# Altium footprint library NFC.PcbLib: 31 footprints (part 1 of 2)
Each footprint in its own frame and in the unit in brackets; x right, y up, seen from the top. Pads: shape width x height; smd on the part's side, far side on the other; paste and mask are expansions set on the pad; w line width, h text height; cw(c..) or ccw(c..) is an arc to the next point about the centre after c.
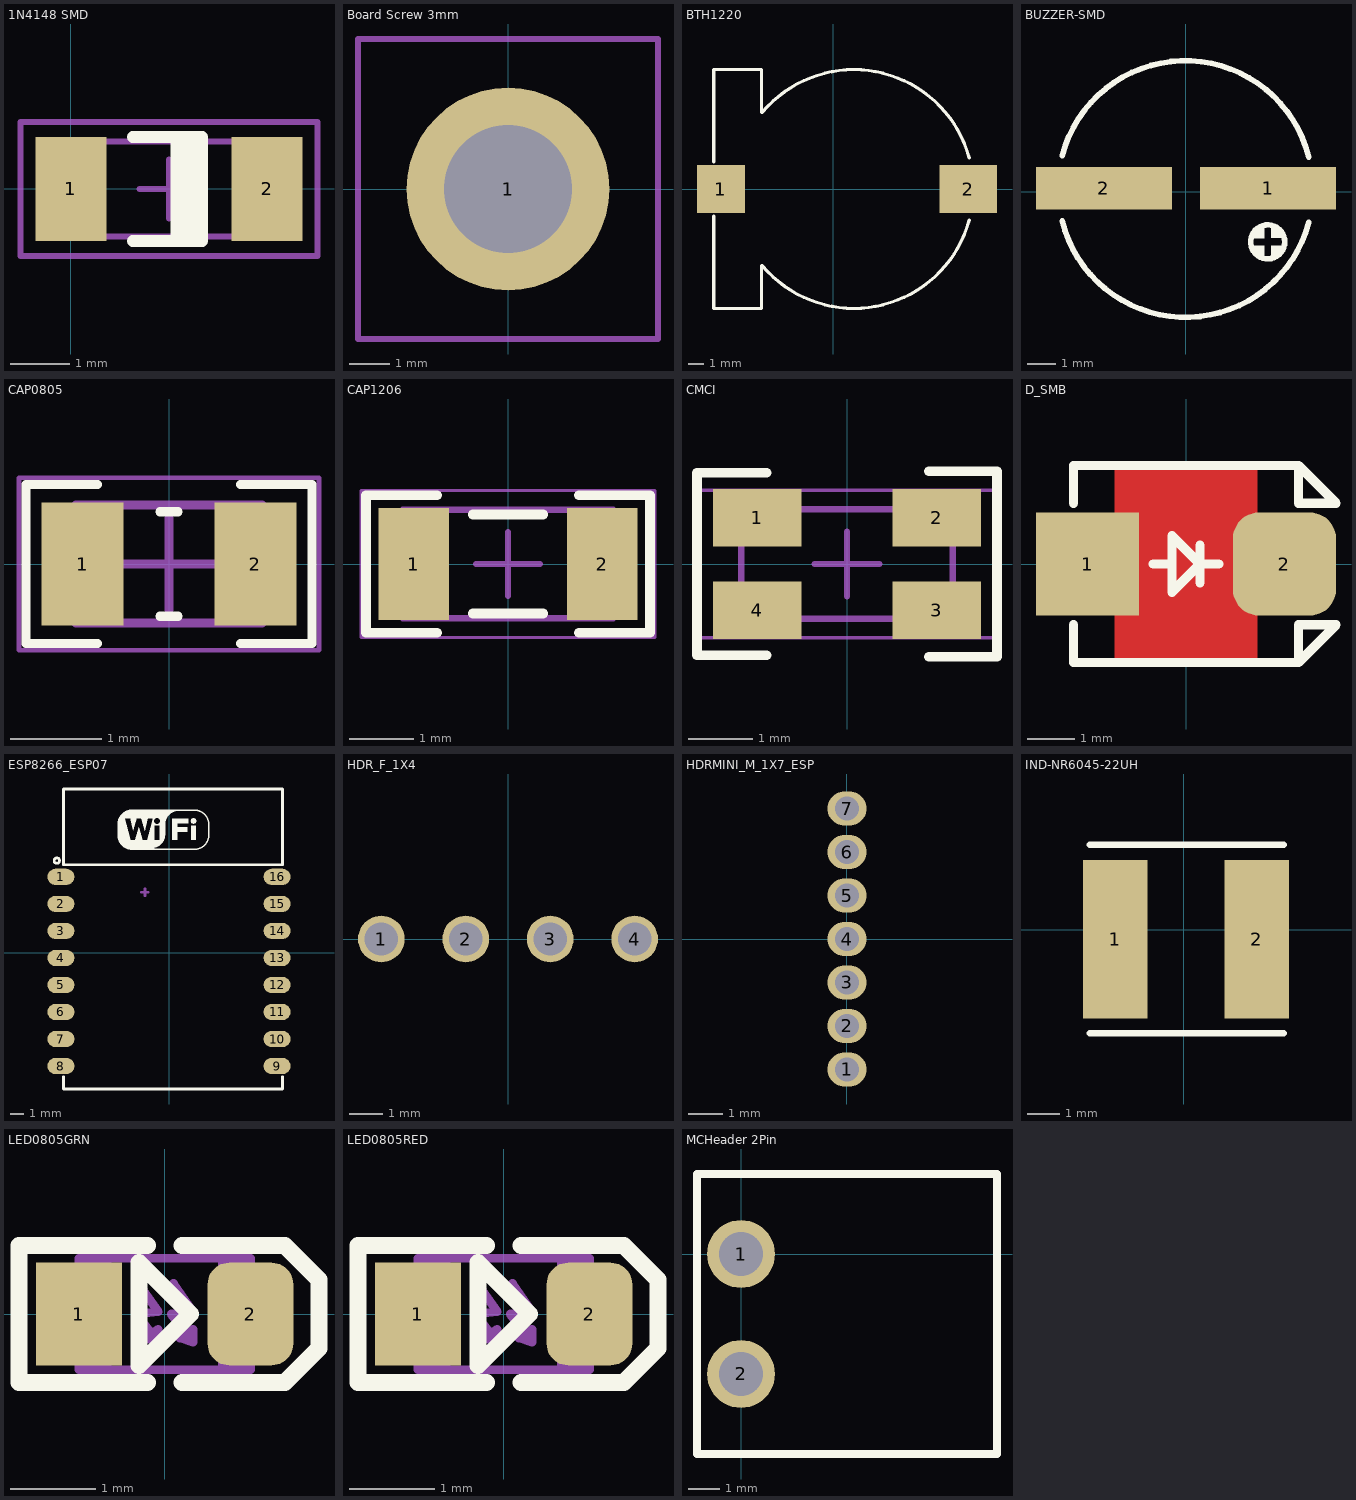
[diagram p0: the footprints below, top view; thin cyan lines are the x and y axes]

## 1N4148 SMD [mm] "Mini MELF SOD-80"
pads (2):
  rect 1.2x1.75 smd: 1(0,0) 2(3.3,0)
Top Overlay:
  region: 2.223,0.875 1.673,0.875 1.673,-0.875 2.223,-0.875
  lines w0.2: 1.04,-0.875 2.209,-0.875 2.209,0.875 1.04,0.875
Mechanical 13:
  rectangle: -0.2,-0.8 0.298,0.8
  lines w0.1: -0.2,-0.8 -0.2,0.8 3.5,0.8 3.5,-0.8 -0.2,-0.8
Mechanical 15:
  lines w0.1: 1.15,0 2.15,0 ; 1.65,-0.5 1.65,0.5 ; -0.85,-1.125 -0.85,1.125 4.15,1.125 4.15,-1.125 -0.85,-1.125
3D body "User Library-Diode MELF.STEP": height 1.55, standoff 0.05, extent -0.125,-0.748 3.375,0.75

## Board Screw 3mm [mm]
pads (1):
  round 5 hole 3.15 mask-0.025: 1(0,0)
Bottom Overlay:
  circle w0.1: c0,0 r2.718
Mechanical 15:
  lines w0.15: -3.7,-3.7 3.7,-3.7 3.7,3.7 -3.7,3.7 -3.7,-3.7
3D body "User Library-User Library-4-40 x _125 sems.STEP": height 2.34, standoff -3, extent -2.656,-2.692 2.681,2.667

## BTH1220 [mm] "COIN CELL BATTERY HOLDER 1220 12mm"
height 2
pads (2):
  rect 3x3 smd: 1(-7.055,0)
  rect 3.6x3 smd: 2(8.489,0)
Top Overlay:
  lines w0.2: -7.5,-1.7 -7.5,-7.5 -4.5,-7.5 -4.5,-4.821 ; -7.5,1.7 -7.5,7.5 -4.5,7.5 -4.5,4.821 ; -4.445,-4.821 ccw(c1.3,0) 8.544,-1.941 ; -4.445,4.821 cw(c1.3,0) 8.544,1.941
3D body "SMD Battery Holder.step": height 4.26, standoff -0.49, extent -8.5,-7.4 10.3,7.349

## BUZZER-SMD [mm]
height 2
pads (2):
  rect 4.8x1.5 smd: 1(2.913,0.134) 2(-2.887,0.134)
Top Overlay:
  circle w0.2: c2.9,-1.766 r0.6
  region: 3.398,-1.893 3.01,-1.893 3.01,-2.266 3.398,-2.266
  region: 3.4,-1.265 3.012,-1.265 3.012,-1.638 3.4,-1.638
  rectangle: 2.402,-1.639 2.79,-1.266
  rectangle: 2.402,-2.266 2.79,-1.893
  lines w0.2: -4.363,-1.032 ccw(c0,0.07) 4.351,-1.078 ; -4.363,1.281 cw(c-0.012,0.134) 4.351,1.235
3D body "FUET-1030-3V.step": height 3.2, standoff 0, extent -5.5,-4.873 5.5,5.127

## CAP0805 [mm] "Chip Capacitor, 2-Leads, Body 2/00x1/25mm, IPC Medium Density DESIGNER:ABBAS BASEREH"
height 0.5
pads (2):
  rect 0.9x1.35 smd: 1(-0.95,0) 2(0.95,0)
Top Overlay:
  lines w0.1: -0.788,-0.875 -1.575,-0.875 -1.575,0.875 -0.788,0.875 ; -0.1,-0.575 0.1,-0.575 ; -0.1,0.575 0.1,0.575 ; 0.788,-0.875 1.575,-0.875 1.575,0.875 0.788,0.875
Mechanical 13:
  lines w0.1: -1.025,-0.65 1.025,-0.65 1.025,0.65 -1.025,0.65 -1.025,-0.65
Mechanical 15:
  lines w0.05: -1.65,-0.95 1.65,-0.95 1.65,0.95 -1.65,0.95 -1.65,-0.95
  lines w0.1: -0.5,0 0.5,0 ; 0,-0.5 0,0.5
3D body "CAP0805.step": height 0.5, standoff 0, extent -1.025,-0.65 1.025,0.65

## CAP1206 [mm] "Chip Capacitor, 2-Leads, Body 3/20x1/60mm, IPC Medium Density DESIGNER:ABBAS BASEREH"
height 0.94
pads (2):
  rect 1.1x1.75 smd: 1(-1.475,0) 2(1.475,0)
Top Overlay:
  lines w0.15: -1.112,-1.075 -2.225,-1.075 -2.225,1.075 -1.112,1.075 ; -0.55,-0.775 0.55,-0.775 ; -0.55,0.775 0.55,0.775 ; 1.112,-1.075 2.225,-1.075 2.225,1.075 1.112,1.075
Mechanical 13:
  lines w0.1: -1.65,-0.85 -1.65,0.85 1.65,0.85 1.65,-0.85 -1.65,-0.85
Mechanical 15:
  lines w0.05: -2.3,-1.15 -2.3,1.15 2.3,1.15 2.3,-1.15 -2.3,-1.15
  lines w0.1: -0.5,0 0.5,0 ; 0,-0.5 0,0.5
3D body "CAP1206.step": height 0.94, standoff 0, extent -1.65,-0.85 1.65,0.85

## CD54-10UH SMD [mm]
3D body "SMD_Inductor_CD54.step": height 4.49, standoff -0.01, extent -3.129,-2.549 2.671,2.651

## CMCI [mm]
pads (4):
  rect 1.38x0.9 smd: 1(-1.4,0.72) 2(1.4,0.72) 3(1.4,-0.72) 4(-1.4,-0.72)
Top Overlay:
  lines w0.15: -1.252,-1.422 -2.337,-1.422 -2.337,1.422 -1.252,1.422 ; 1.278,-1.448 2.337,-1.448 2.337,1.448 1.278,1.448
Mechanical 13:
  lines w0.1: -1.65,-0.85 -1.65,0.85 1.65,0.85 1.65,-0.85 -1.65,-0.85
Mechanical 15:
  lines w0.05: -2.3,-1.15 -2.3,1.15 2.3,1.15 2.3,-1.15 -2.3,-1.15
  lines w0.1: -0.5,0 0.5,0 ; 0,-0.5 0,0.5
3D body "IND_DLW31S_1206_MUR.step": height 2.1, standoff 0, extent -1.7,-0.9 1.7,0.9

## D_SMB [mm] "SMB Molded Diode, 2-Leads, Body 4.3x3.5mm"
pads (2):
  rect 2.2x2.2 smd paste-0.1: 1(-2.1,0)
  rrect50% 2.2x2.2 smd paste-0.1: 2(2.1,0)
Top Layer:
  pour cut-out: -1.524,2.1 -1.524,-2.1 1.524,-2.1 1.524,2.1
Top Overlay:
  lines w0.2: -2.4,-1.3 -2.4,-2.1 2.4,-2.1 ; -2.4,1.3 -2.4,2.1 2.4,2.1 ; -0.7,0 -0.3,0 ; 0.3,-0.4 0.3,0.4 ; 0.7,0 0.3,0 ; 0.3,0 -0.3,-0.6 -0.3,0.6 0.3,0 ; 2.4,-2.1 3.2,-1.3 2.4,-1.3 2.4,-2.1 ; 2.4,2.1 2.4,1.3 3.2,1.3 2.4,2.1
3D body "User Library-DIOM5539X24.step": height 2.45, standoff 0.03, extent -2.75,-1.95 2.75,1.95

## ESP8266_ESP07 [mm] "ESP8266 ESP-07"
pads (16):
  oval 2x1.2 smd: 1(-8,5.6) 2(-8,3.6) 3(-8,1.6) 4(-8,-0.4) 5(-8,-2.4) 6(-8,-4.4) 7(-8,-6.4) 8(-8,-8.4) 9(8,-8.4) 10(8,-6.4) 11(8,-4.4) 12(8,-2.4) 13(8,-0.4) 14(8,1.6) 15(8,3.6) 16(8,5.6)
Top Overlay:
  drawing of 12 lines, arcs and shapes, not listed
Mechanical 15:
  lines w0.2: -2.034,4.456 -1.526,4.456 ; -1.78,4.202 -1.78,4.71
3D body "User Library-ESP07-1.step": height 3.5, standoff -0.01, extent -7.681,-9.987 8.319,12.013

## HDR_F_1X4 [mm] "HEADER FEMALE pitch: 2.54mm"
pads (4):
  round 1.4 / inner round 1.4 / far side oval 1.4x2.2 hole 1 mask+0.1: 1(-3.81,0) 2(-1.27,0) 3(1.27,0) 4(3.81,0)
3D body "female_header_a-bl254-eg-g02d.stp": height 8.5, standoff -3.2, extent -0.125,-1.3 5.205,1.2
3D body "female_header_a-bl254-eg-g02d.stp": height 8.5, standoff -3.2, extent -5.205,-1.3 0.125,1.2

## HDRMINI_M_1X7_ESP [mm]
pads (7):
  oval 1.143x1 hole 0.7 mask+0.05: 1(0.013,-3.803) 2(0.013,-2.533) 3(0.013,-1.263) 4(0.013,0.007) 5(0.013,1.277) 6(0.013,2.547) 7(0.013,3.817)

## IND-NR6045-22UH [mm]
pads (2):
  rect 2x4.9 smd paste-0.2: 1(-2.117,-0.289) 2(2.26,-0.289)
Top Overlay:
  lines w0.2: -2.9,-3.2 3.1,-3.2 ; -2.9,2.626 3.1,2.626

## LED0805GRN [mm] "LED SMD 0805, GREEN"
height 1.4
pads (2):
  rect 1x1.2 smd paste-2 mask+0.075: 1(-1,0)
  rrect50% 1x1.2 smd paste-2 mask+0.075: 2(1,0)
Top Overlay:
  lines w0.2: -0.2,-0.8 -1.7,-0.8 -1.7,0.8 -0.2,0.8 ; 0.2,-0.8 1.4,-0.8 1.8,-0.4 1.8,0.4 1.4,0.8 0.2,0.8 ; -0.3,-0.6 -0.3,0.6 0.3,0 -0.3,-0.6
Top Paste:
  region: -1,0.5 -0.92,0.5 -0.773,0.439 -0.661,0.327 -0.6,0.18 -0.6,0.1 -0.6,-0.1 -0.6,-0.18 -0.661,-0.327 -0.773,-0.439 -0.92,-0.5 -1,-0.5 -1.25,-0.5 -1.28,-0.5 -1.335,-0.477 -1.377,-0.435 -1.4,-0.38 -1.4,-0.35 -1.4,0.35 -1.4,0.38 -1.377,0.435 -1.335,0.477 -1.28,0.5 -1.25,0.5
  region: 1,0.5 0.92,0.5 0.773,0.439 0.661,0.327 0.6,0.18 0.6,0.1 0.6,-0.1 0.6,-0.18 0.661,-0.327 0.773,-0.439 0.92,-0.5 1,-0.5 1.25,-0.5 1.28,-0.5 1.335,-0.477 1.377,-0.435 1.4,-0.38 1.4,-0.35 1.4,0.35 1.4,0.38 1.377,0.435 1.335,0.477 1.28,0.5 1.25,0.5
Mechanical 13:
  rectangle: -0.848,-0.65 -0.619,0.65
  region: 0.848,0.65 0.619,0.65 0.619,-0.65 0.848,-0.65
  rectangle: -0.993,0.191 -0.841,0.651
  rectangle: -0.993,-0.649 -0.841,-0.19
  region: 0.993,0.649 0.841,0.649 0.841,0.19 0.993,0.19
  region: 0.993,-0.191 0.841,-0.191 0.841,-0.651 0.993,-0.651
  lines w0.102: -0.305,0.356 -0.076,0.025 -0.33,0 -0.076,-0.33 ; 0.102,0.356 0.33,0.025 0.076,0 0.33,-0.33 ; -0.076,-0.33 -0.076,-0.178 -0.229,-0.279 -0.076,-0.33 ; 0.33,-0.33 0.33,-0.178 0.178,-0.279 0.33,-0.33 ; -1,-0.65 1,-0.65 1,-0.19 cw(c1,0) 1,0.191 1,0.65 -1,0.65 -1,0.191 cw(c-1,0) -1,-0.191 -1,-0.65
3D body "User Library-Wurth Elektronik WL-SMCW 0805 (2012) LED Base (Separate Lens).step": height 0.64, standoff 0, extent -1,-0.625 1,0.625
3D body "User Library-Wurth Elektronik WL-SMCW 0805 (2012) LED Lens (Separate Body).step": height 0.7, standoff 0.3, extent -0.7,-0.625 0.7,0.625

## LED0805RED [mm] "LED SMD 0805, RED"
height 1.4
pads (2):
  rect 1x1.2 smd paste-2 mask+0.075: 1(-1,0)
  rrect50% 1x1.2 smd paste-2 mask+0.075: 2(1,0)
Top Overlay:
  lines w0.2: -0.2,-0.8 -1.7,-0.8 -1.7,0.8 -0.2,0.8 ; 0.2,-0.8 1.4,-0.8 1.8,-0.4 1.8,0.4 1.4,0.8 0.2,0.8 ; -0.3,-0.6 -0.3,0.6 0.3,0 -0.3,-0.6
Top Paste:
  region: 1,0.5 0.92,0.5 0.773,0.439 0.661,0.327 0.6,0.18 0.6,0.1 0.6,-0.1 0.6,-0.18 0.661,-0.327 0.773,-0.439 0.92,-0.5 1,-0.5 1.25,-0.5 1.28,-0.5 1.335,-0.477 1.377,-0.435 1.4,-0.38 1.4,-0.35 1.4,0.35 1.4,0.38 1.377,0.435 1.335,0.477 1.28,0.5 1.25,0.5
  region: -1,0.5 -0.92,0.5 -0.773,0.439 -0.661,0.327 -0.6,0.18 -0.6,0.1 -0.6,-0.1 -0.6,-0.18 -0.661,-0.327 -0.773,-0.439 -0.92,-0.5 -1,-0.5 -1.25,-0.5 -1.28,-0.5 -1.335,-0.477 -1.377,-0.435 -1.4,-0.38 -1.4,-0.35 -1.4,0.35 -1.4,0.38 -1.377,0.435 -1.335,0.477 -1.28,0.5 -1.25,0.5
Mechanical 13:
  rectangle: -0.848,-0.65 -0.619,0.65
  rectangle: -0.995,0.189 -0.843,0.648
  rectangle: -0.995,-0.652 -0.843,-0.192
  region: 0.848,0.65 0.619,0.65 0.619,-0.65 0.848,-0.65
  region: 0.995,0.652 0.843,0.652 0.843,0.192 0.995,0.192
  region: 0.995,-0.189 0.843,-0.189 0.843,-0.648 0.995,-0.648
  lines w0.102: -0.305,0.356 -0.076,0.025 -0.33,0 -0.076,-0.33 ; 0.102,0.356 0.33,0.025 0.076,0 0.33,-0.33 ; -0.076,-0.33 -0.076,-0.178 -0.229,-0.279 -0.076,-0.33 ; 0.33,-0.33 0.33,-0.178 0.178,-0.279 0.33,-0.33 ; -1,-0.65 1,-0.65 1,-0.19 cw(c1,0) 1,0.191 1,0.65 -1,0.65 -1,0.191 cw(c-1,0) -1,-0.191 -1,-0.65
3D body "User Library-Wurth Elektronik WL-SMCW 0805 (2012) LED Base (Separate Lens).step": height 0.64, standoff 0, extent -1,-0.625 1,0.625
3D body "User Library-Wurth Elektronik WL-SMCW 0805 (2012) LED Lens (Separate Body).step": height 0.7, standoff 0.3, extent -0.7,-0.625 0.7,0.625

## MCHeader 2Pin [mil]
pads (2):
  round 85 hole 55: 1(0,0) 2(0,-150)
Top Overlay:
  lines w10: -55,-250 -55,100 320,100 320,-250 -55,-250
3D body "mini combicon header 2pin.STEP": height 292.32, standoff -130.12, extent -43.09,-247.85 321.09,99